# EAGLE library part TCAN1044AVDRQ1 (library TCAN1044AVDRQ1)
CAN Interface IC Enhanced automotive CAN transceiver with standby and 1.8-V I/O support Source: Datasheet <https://www.ti.com/lit/gpn/tcan1044av-q1>
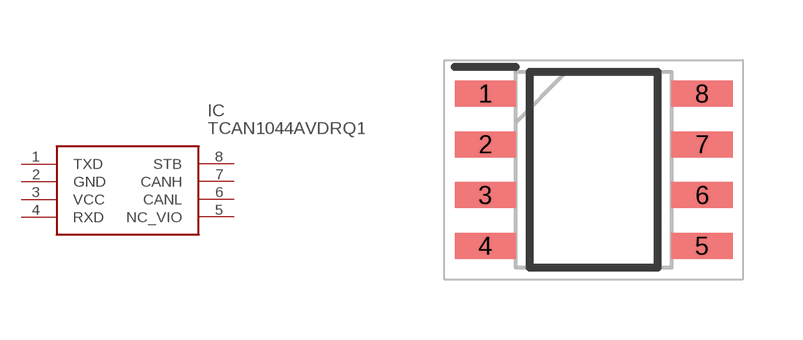
[diagram p0: symbol with the pads of SOIC127P600X175-8N; footprint SOIC127P600X175-8N]

Designator prefix IC

## TCAN1044AVDRQ1 (Arrow_Part_Number: TCAN1044AVDRQ1; Arrow_Price-Stock: https://www.arrow.com/en/products/tcan1044avdrq1/texas-instruments.html?utm_currency=USD&region=europe; Description: CAN Interface IC Enhanced automotive CAN transceiver with standby and 1.8-V I/O support; Height: 1.75mm; Manufacturer_Name: Texas Instruments; Manufacturer_Part_Number: TCAN1044AVDRQ1; Mouser_Part_Number: 595-TCAN1044AVDRQ1; Mouser_Price-Stock: https://www.mouser.co.uk/ProductDetail/Texas-Instruments/TCAN1044AVDRQ1?qs=A6eO%252BMLsxmTQ0G0Mn%252B%252BM7w%3D%3D)  [SOIC127P600X175-8N]
1  TXD
2  GND
3  VCC
4  RXD
5  NC_VIO
6  CANL
7  CANH
8  STB

## Footprint SOIC127P600X175-8N (pad centres in mm)
D0008A
smd 1.528 x 0.65: 1 -2.711,1.905; 2 -2.711,0.635; 3 -2.711,-0.635; 4 -2.711,-1.905; 5 2.711,-1.905; 6 2.711,-0.635; 7 2.711,0.635; 8 2.711,1.905